# Altium footprint library Resistores_Potencia.PcbLib: 3 footprints
Each footprint in its own frame and in the unit in brackets; x right, y up, seen from the top. Pads: shape width x height; smd on the part's side, far side on the other; paste and mask are expansions set on the pad; w line width, h text height; cw(c..) or ccw(c..) is an arc to the next point about the centre after c.
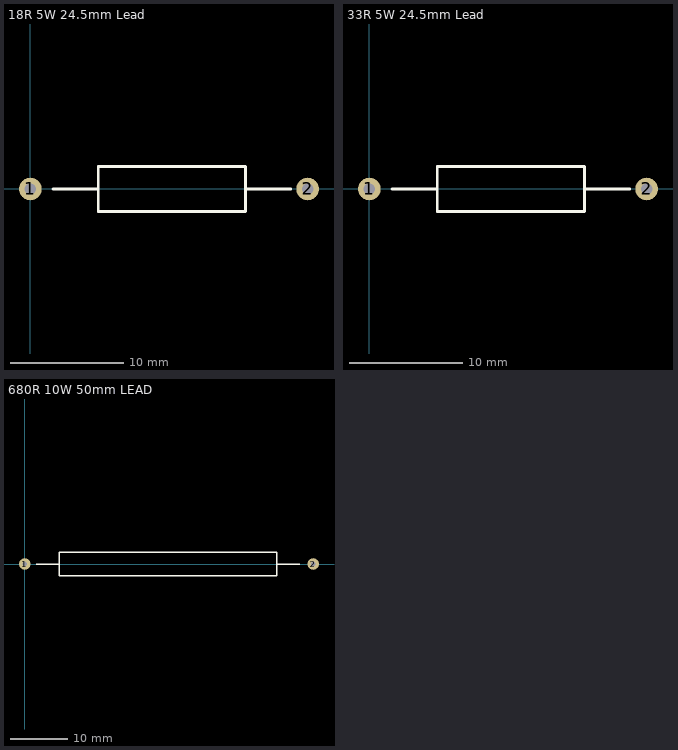
[diagram p0: the footprints below, top view; thin cyan lines are the x and y axes]

## 18R 5W 24.5mm Lead [mm]
pads (2):
  round 2 hole 1: 1(0,0) 2(24.5,0)
Top Overlay:
  lines w0.254: 2,0 6,0 ; 23,0 19,0 ; 19,0 19,-1 19,-2 6,-2 6,2 19,2 19,1 19,0
3D body "RESISTOR_RAFA_18.STEP": height 7.4, standoff -3, extent -0.35,-3.4 24.95,3.4

## 33R 5W 24.5mm Lead [mm]
pads (2):
  round 2 hole 1: 1(0,0) 2(24.5,0)
Top Overlay:
  lines w0.254: 2,0 6,0 ; 23,0 19,0 ; 19,0 19,-1 19,-2 6,-2 6,2 19,2 19,1 19,0
3D body "RESISTOR_RAFA (2).STEP": height 7.4, standoff -3, extent -0.35,-3.4 24.95,3.4

## 680R 10W 50mm LEAD [mm]
pads (2):
  round 2 hole 0.8: 1(0,0) 2(50,0)
Top Overlay:
  lines w0.254: 2,0 6,0 ; 43.688,0 47.688,0 ; 6,-2 43.688,-2 43.688,2 6,2 6,-2
3D body "Resistor.STEP": height 15.5, standoff -3, extent -0.508,-3.5 50.492,3.5